# Altium footprint library FootPrintLib_3.PcbLib: 198 footprints (part 3 of 13)
Each footprint in its own frame and in the unit in brackets; x right, y up, seen from the top. Pads: shape width x height; smd on the part's side, far side on the other; paste and mask are expansions set on the pad; w line width, h text height; cw(c..) or ccw(c..) is an arc to the next point about the centre after c.
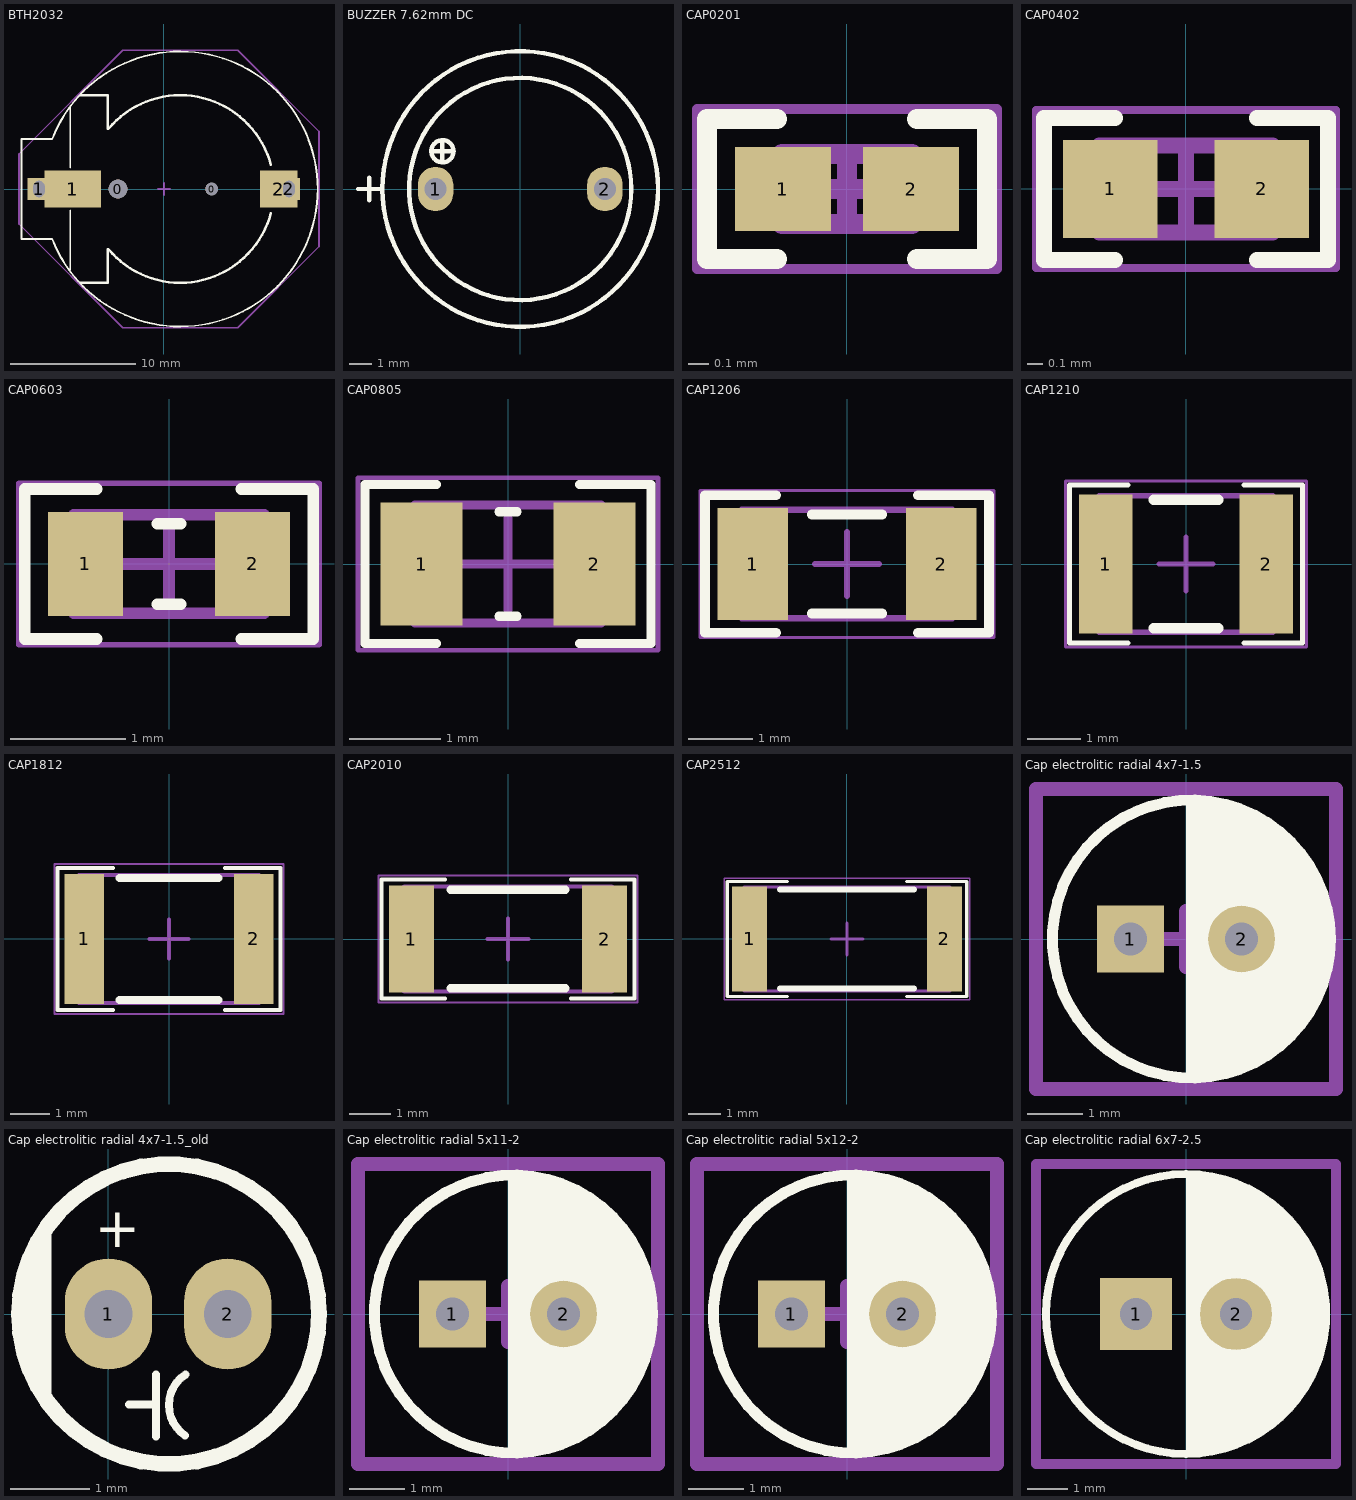
[diagram p2: the footprints below, top view; thin cyan lines are the x and y axes]

## BTH2032 [mm] "COIN CELL BATTERY HOLDER 1220 12mm CR2032"
height 2
pads (6):
  round 1.5 hole 1.5 unplated: 0(-3.683,0)
  round 1 hole 1 unplated: 0(3.81,0)
  rect 1.8x1.8 hole 0.9 slot 1.3 at 90 deg: 1(-10,0) 2(10,0)
  rect 4.5x3 smd: 1(-7.3,0)
  rect 3x3 smd: 2(9.2,0)
Top Overlay:
  lines w0.15: -8.962,4 -11.4,4 -11.4,-4 -8.954,-4 ; -8.948,-3.998 ccw(c1.3,0) -8.949,3.995 ; -7.5,-6.5 -7.5,-1.7 ; -7.5,1.7 -7.5,6.6
  lines w0.2: -6.7,-7.5 -4.5,-7.5 -4.5,-4.821 ; -6.7,7.5 -4.5,7.5 -4.5,4.821 ; -4.445,-4.821 ccw(c1.3,0) 8.544,-1.941 ; -4.445,4.821 cw(c1.3,0) 8.544,1.941
Mechanical 15:
  lines w0.15: -0.5,0 0.5,0 ; 0,-0.5 0,0.5 ; -11.6,-2.8 -3.3,-11.1 5.9,-11.1 12.4,-4.6 12.4,4.6 5.9,11.1 -3.3,11.1 -11.6,2.8 -11.6,-2.8
3D body "1220.STEP": height 4.35, standoff -0.9, extent -9,-7.375 10.201,7.374

## BUZZER 7.62mm DC [mm] "BUZZER 12mm DIA , 7.62mm pitch DESIGNER ABBAS BASEREH"
height 7.62
pads (2):
  oval 1.6x2 hole 1: 1(-3.81,0) 2(3.81,0)
Top Overlay:
  circle w0.2: c0,0 r6.2
  circle w0.2: c-3.5,1.7 r0.5
  circle w0.2: c0,0 r5
  lines w0.2: -7.3,0 -6.3,0 ; -6.8,-0.5 -6.8,0.5 ; -4,1.7 -3,1.7 ; -3.5,1.2 -3.5,2.2
3D body "User Library-Buzzer CEM-1205C.step": height 9.5, standoff -3.5, extent -6,-5.997 6,5.997

## CAP0201 [mm] "Chip Capacitor, 2-Leads, Body 0/60x0/30mm, IPC Medium Density DESIGNER:ABBAS BASEREH"
height 0.23
pads (2):
  rect 0.48x0.42 smd mask+0.04: 1(-0.32,0) 2(0.32,0)
Top Overlay:
  lines w0.1: -0.35,-0.35 -0.7,-0.35 -0.7,0.35 -0.35,0.35 ; 0.35,-0.35 0.7,-0.35 0.7,0.35 0.35,0.35
Mechanical 13:
  lines w0.1: -0.325,-0.175 -0.325,0.175 0.325,0.175 0.325,-0.175 -0.325,-0.175
Mechanical 15:
  lines w0.05: -0.75,-0.4 -0.75,0.4 0.75,0.4 0.75,-0.4 -0.75,-0.4
  lines w0.1: -0.175,0 0.175,0 ; 0,-0.175 0,0.175
3D body "CAP0201.step": height 0.23, standoff 0, extent -0.325,-0.175 0.325,0.175

## CAP0402 [mm] "Chip Capacitor, 2-Leads, Body 1/00x0/50mm, IPC Medium Density DESIGNER:ABBAS BASEREH"
height 0.32
pads (2):
  rect 0.6x0.62 smd mask+0.06: 1(-0.48,0) 2(0.48,0)
Top Overlay:
  lines w0.1: -0.45,-0.45 -0.9,-0.45 -0.9,0.45 -0.45,0.45 ; 0.45,-0.45 0.9,-0.45 0.9,0.45 0.45,0.45
Mechanical 13:
  lines w0.1: -0.55,-0.275 0.55,-0.275 0.55,0.275 -0.55,0.275 -0.55,-0.275
Mechanical 15:
  lines w0.05: -0.95,-0.5 0.95,-0.5 0.95,0.5 -0.95,0.5 -0.95,-0.5
  lines w0.1: -0.275,0 0.275,0 ; 0,-0.275 0,0.275
3D body "CAP0402.step": height 0.32, standoff 0, extent -0.55,-0.275 0.55,0.275

## CAP0603 [mm] "Chip Capacitor, 2-Leads, Body 1/60x0/80mm, IPC Medium Density DESIGNER:ABBAS BASEREH"
height 0.4
pads (2):
  rect 0.65x0.9 smd: 1(-0.725,0) 2(0.725,0)
Top Overlay:
  lines w0.1: -0.625,-0.65 -1.25,-0.65 -1.25,0.65 -0.625,0.65 ; -0.1,-0.35 0.1,-0.35 ; -0.1,0.35 0.1,0.35 ; 0.625,-0.65 1.25,-0.65 1.25,0.65 0.625,0.65
Mechanical 13:
  lines w0.1: -0.825,-0.425 -0.825,0.425 0.825,0.425 0.825,-0.425 -0.825,-0.425
Mechanical 15:
  lines w0.05: -1.3,-0.7 -1.3,0.7 1.3,0.7 1.3,-0.7 -1.3,-0.7
  lines w0.1: -0.425,0 0.425,0 ; 0,-0.425 0,0.425
3D body "CAP0603.step": height 0.4, standoff 0, extent -0.825,-0.425 0.825,0.425

## CAP0805 [mm] "Chip Capacitor, 2-Leads, Body 2/00x1/25mm, IPC Medium Density DESIGNER:ABBAS BASEREH"
height 0.5
pads (2):
  rect 0.9x1.35 smd: 1(-0.95,0) 2(0.95,0)
Top Overlay:
  lines w0.1: -0.788,-0.875 -1.575,-0.875 -1.575,0.875 -0.788,0.875 ; -0.1,-0.575 0.1,-0.575 ; -0.1,0.575 0.1,0.575 ; 0.788,-0.875 1.575,-0.875 1.575,0.875 0.788,0.875
Mechanical 13:
  lines w0.1: -1.025,-0.65 1.025,-0.65 1.025,0.65 -1.025,0.65 -1.025,-0.65
Mechanical 15:
  lines w0.05: -1.65,-0.95 1.65,-0.95 1.65,0.95 -1.65,0.95 -1.65,-0.95
  lines w0.1: -0.5,0 0.5,0 ; 0,-0.5 0,0.5
3D body "CAP0805.step": height 0.5, standoff 0, extent -1.025,-0.65 1.025,0.65

## CAP1206 [mm] "Chip Capacitor, 2-Leads, Body 3/20x1/60mm, IPC Medium Density DESIGNER:ABBAS BASEREH"
height 0.94
pads (2):
  rect 1.1x1.75 smd: 1(-1.475,0) 2(1.475,0)
Top Overlay:
  lines w0.15: -1.112,-1.075 -2.225,-1.075 -2.225,1.075 -1.112,1.075 ; -0.55,-0.775 0.55,-0.775 ; -0.55,0.775 0.55,0.775 ; 1.112,-1.075 2.225,-1.075 2.225,1.075 1.112,1.075
Mechanical 13:
  lines w0.1: -1.65,-0.85 -1.65,0.85 1.65,0.85 1.65,-0.85 -1.65,-0.85
Mechanical 15:
  lines w0.05: -2.3,-1.15 -2.3,1.15 2.3,1.15 2.3,-1.15 -2.3,-1.15
  lines w0.1: -0.5,0 0.5,0 ; 0,-0.5 0,0.5
3D body "CAP1206.step": height 0.94, standoff 0, extent -1.65,-0.85 1.65,0.85

## CAP1210 [mm] "Chip Capacitor, 2-Leads, Body 3/20x2/50mm, IPC Medium Density DESIGNER:ABBAS BASEREH"
height 0.55
pads (2):
  rect 1x2.6 smd: 1(-1.5,0) 2(1.5,0)
Top Overlay:
  lines w0.1: -1.087,-1.475 -2.175,-1.475 -2.175,1.475 -1.087,1.475 ; 1.087,-1.475 2.175,-1.475 2.175,1.475 1.087,1.475
  lines w0.2: -0.6,-1.2 0.6,-1.2 ; -0.6,1.2 0.6,1.2
Mechanical 13:
  lines w0.1: -1.625,-1.275 -1.625,1.275 1.625,1.275 1.625,-1.275 -1.625,-1.275
Mechanical 15:
  lines w0.05: -2.25,-1.55 -2.25,1.55 2.25,1.55 2.25,-1.55 -2.25,-1.55
  lines w0.1: -0.5,0 0.5,0 ; 0,-0.5 0,0.5
3D body "CAP1210.step": height 0.55, standoff 0, extent -1.625,-1.275 1.625,1.275

## CAP1812 [mm] "Chip Capacitor, 2-Leads, Body 4/50x3/20mm, IPC Medium Density DESIGNER:ABBAS BASEREH"
height 0.55
pads (2):
  rect 1x3.3 smd: 1(-2.15,0) 2(2.15,0)
Top Overlay:
  lines w0.1: -1.413,-1.8 -2.825,-1.8 -2.825,1.8 -1.413,1.8 ; 1.413,-1.8 2.825,-1.8 2.825,1.8 1.413,1.8
  lines w0.2: -1.25,-1.55 1.25,-1.55 ; -1.25,1.55 1.25,1.55
Mechanical 13:
  lines w0.1: -2.275,-1.625 -2.275,1.625 2.275,1.625 2.275,-1.625 -2.275,-1.625
Mechanical 15:
  lines w0.05: -2.9,-1.9 -2.9,1.9 2.9,1.9 2.9,-1.9 -2.9,-1.9
  lines w0.1: -0.5,0 0.5,0 ; 0,-0.5 0,0.5
3D body "CAP1812.step": height 0.55, standoff 0, extent -2.275,-1.625 2.275,1.625

## CAP2010 [mm] "Chip Capacitor, 2-Leads, Body 5/00x2/50mm, IPC Medium Density DESIGNER:ABBAS BASEREH"
height 0.55
pads (2):
  rect 1.1x2.6 smd: 1(-2.35,0) 2(2.35,0)
Top Overlay:
  lines w0.1: -1.538,-1.45 -3.075,-1.45 -3.075,1.45 -1.538,1.45 ; 1.538,-1.45 3.075,-1.45 3.075,1.45 1.538,1.45
  lines w0.2: -1.4,-1.2 1.4,-1.2 ; -1.4,1.2 1.4,1.2
Mechanical 13:
  lines w0.1: -2.525,-1.275 2.525,-1.275 2.525,1.275 -2.525,1.275 -2.525,-1.275
Mechanical 15:
  lines w0.05: -3.15,-1.55 3.15,-1.55 3.15,1.55 -3.15,1.55 -3.15,-1.55
  lines w0.1: -0.5,0 0.5,0 ; 0,-0.5 0,0.5
3D body "CAP2010.step": height 0.55, standoff 0, extent -2.525,-1.275 2.525,1.275

## CAP2512 [mm] "Chip Capacitor, 2-Leads, Body 6/40x3/20mm, IPC Medium Density DESIGNER:ABBAS BASEREH"
height 0.7
pads (2):
  rect 1.1x3.3 smd: 1(-3.05,0) 2(3.05,0)
Top Overlay:
  lines w0.1: -1.875,-1.8 -3.75,-1.8 -3.75,1.8 -1.875,1.8 ; 1.875,-1.8 3.75,-1.8 3.75,1.8 1.875,1.8
  lines w0.2: -2.1,-1.55 2.1,-1.55 ; -2.1,1.55 2.1,1.55
Mechanical 13:
  lines w0.1: -3.225,-1.625 3.225,-1.625 3.225,1.625 -3.225,1.625 -3.225,-1.625
Mechanical 15:
  lines w0.05: -3.85,-1.9 3.85,-1.9 3.85,1.9 -3.85,1.9 -3.85,-1.9
  lines w0.1: -0.5,0 0.5,0 ; 0,-0.5 0,0.5
3D body "CAP2512.step": height 0.7, standoff 0, extent -3.225,-1.625 3.225,1.625

## Cap electrolitic radial 4x7-1.5 [mm] "Cap electrolitic radial 5x11-2-Design:Abbas Basereh"
height 11
pads (2):
  rect 1.2x1.2 hole 0.6: 1(-1,0)
  round 1.2 hole 0.6: 2(1,0)
Top Overlay:
  circle w0.2: c0.096,0 r2.5
  region: 0,2.5 0.1,2.5 0.346,2.5 0.829,2.404 1.284,2.215 1.694,1.942 2.042,1.594 2.315,1.184 2.504,0.729 2.6,0.246 2.6,0 2.6,-0.246 2.504,-0.729 2.315,-1.184 2.042,-1.594 1.694,-1.942 1.284,-2.215 0.829,-2.404 0.346,-2.5 0.1,-2.5 0,-2.5
Mechanical 15:
  lines w0.254: -0.5,0 0.5,0 ; 0,-0.5 0,0.5 ; -2.7,-2.7 2.7,-2.7 2.7,2.7 -2.7,2.7 -2.7,-2.7
3D body "User Library-Cap-EL(5x11-2)T.STEP": height 11.3, standoff -2.5, extent -2.5,-2.498 2.502,2.498

## Cap electrolitic radial 4x7-1.5_old [mm] "Cap electrolitic radial 5x11-2-Design:Ali Hafizi"
pads (2):
  oval 1.1x1.4 hole 0.6: 1(0,0) 2(1.5,0)
Top Overlay:
  circle w0.2: c0.762,0 r1.888
  lines w0.1: 0.26,-1.14 0.6,-1.14 ; 0.6,-1.54 0.6,-0.76 ; 0.966,-1.53 cw(c1.218,-1.147) 0.968,-0.763
  lines w0.2: -1,-0.6 -1,0.6 ; -0.82,-0.98 -0.82,1.02
  text "+" at -0.17,0.84 h0.5
3D body "User Library-Cap 4x7.STEP": height 8.5, standoff -15.5, extent -1.25,-2 2.75,2

## Cap electrolitic radial 5x11-2 [mm] "Cap electrolitic radial 5x11-2-Design:Abbas Basereh"
height 11
pads (2):
  rect 1.2x1.2 hole 0.6: 1(-1,0)
  round 1.2 hole 0.6: 2(1,0)
Top Overlay:
  circle w0.2: c0.096,0 r2.5
  region: 0,2.5 0.1,2.5 0.346,2.5 0.829,2.404 1.284,2.215 1.694,1.942 2.042,1.594 2.315,1.184 2.504,0.729 2.6,0.246 2.6,0 2.6,-0.246 2.504,-0.729 2.315,-1.184 2.042,-1.594 1.694,-1.942 1.284,-2.215 0.829,-2.404 0.346,-2.5 0.1,-2.5 0,-2.5
Mechanical 15:
  lines w0.254: -0.5,0 0.5,0 ; 0,-0.5 0,0.5 ; -2.7,-2.7 2.7,-2.7 2.7,2.7 -2.7,2.7 -2.7,-2.7
3D body "User Library-Cap-EL(5x11-2)T.STEP": height 11.3, standoff -2.5, extent -2.5,-2.498 2.502,2.498

## Cap electrolitic radial 5x12-2 [mm] "Cap electrolitic radial 5x12-2-Design:Abbas Basereh"
height 12
pads (2):
  rect 1.2x1.2 hole 0.6: 1(-1,0)
  round 1.2 hole 0.6: 2(1,0)
Top Overlay:
  circle w0.2: c0.096,0 r2.5
  region: 0,2.5 0.1,2.5 0.346,2.5 0.829,2.404 1.284,2.215 1.694,1.942 2.042,1.594 2.315,1.184 2.504,0.729 2.6,0.246 2.6,0 2.6,-0.246 2.504,-0.729 2.315,-1.184 2.042,-1.594 1.694,-1.942 1.284,-2.215 0.829,-2.404 0.346,-2.5 0.1,-2.5 0,-2.5
Mechanical 15:
  lines w0.254: -0.5,0 0.5,0 ; 0,-0.5 0,0.5 ; -2.7,-2.7 -2.7,2.7 2.7,2.7 2.7,-2.7 -2.7,-2.7
3D body "User Library-CAP-EL5X12_R100_D200_H460.STEP": height 12.2, standoff -2.9, extent -2.54,-2.538 2.54,2.538

## Cap electrolitic radial 6x7-2.5 [mm] "Cap electrolitic radial 6x7-2.5-Design:Abbas Basereh"
height 7
pads (2):
  rect 1.8x1.8 hole 0.8: 1(-1.25,0)
  round 1.8 hole 0.8: 2(1.25,0)
Top Overlay:
  circle w0.2: c0,0 r3.5
  region: 0,3.5 0.096,3.5 0.325,3.5 0.78,3.44 1.223,3.321 1.647,3.146 2.045,2.916 2.409,2.637 2.733,2.313 3.012,1.949 3.242,1.551 3.417,1.127 3.536,0.684 3.596,0.229 3.596,0 3.596,-0.229 3.536,-0.684 3.417,-1.127 3.242,-1.551 3.012,-1.949 2.733,-2.313 2.409,-2.637 2.045,-2.916 1.647,-3.146 1.223,-3.321 0.78,-3.44 0.325,-3.5 0.096,-3.5 0,-3.5
Mechanical 15:
  lines w0.254: -3.75,-3.75 -3.75,3.75 3.75,3.75 3.75,-3.75 -3.75,-3.75
3D body "User Library-Cap electrolitic radial 6x7.STEP": height 7.3, standoff -1.2, extent -2.999,-2.999 2.999,2.998